# Altium integrated library 10033526-N3212MLF.IntLib: 1 symbol
Pins are listed as number, name and electrical type; pins without a type are passive.

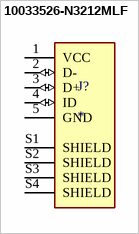
[diagram p0: symbol 10033526-N3212MLF]

## 10033526-N3212MLF
designator J?
Right Angle Surface Mount Mount Female Type B USB Connector | Amphenol FCI (Amphenol CS) 10033526-N3212MLF; MF: Amphenol ICC; SnapEDA_Link: https://www.snapeda.com/parts/10033526-N3212MLF/Amphenol/view-part/?ref=snap; Package: None; Value: *; MP: 10033526-N3212MLF; Check_prices: https://www.snapeda.com/parts/10033526-N3212MLF/Amphenol/view-part/?ref=eda
footprint AMPHENOL_10033526-N3212MLF
pins: 1 VCC (power), 2 D- (io), 3 D+ (io), 4 ID (io), 5 GND (power), S1 SHIELD, S2 SHIELD, S3 SHIELD, S4 SHIELD